# Altium schematic symbol library LQH32MN220J23L.SchLib: 1 symbol
Pins are listed as number, name and electrical type; pins without a type are passive.

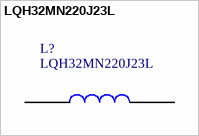
[diagram p0: symbol LQH32MN220J23L]

## LQH32MN220J23L
designator L?
/ Inductor with Inductance: 22uH Tol. +/-5%, Package: 1210 (3225) /; MF: Murata; SnapEDA_Link: https://www.snapeda.com/parts/LQH32MN220J23L/Murata/view-part/4549823/?ref=snap; MP: LQH32MN220J23L; Check_prices: https://www.snapeda.com/parts/LQH32MN220J23L/Murata/view-part/4549823/?ref=eda; Package: NONSTANDARD; DigiKey-Purchase-URL: https://snapeda.com/shop?store=DigiKey&id=4549823; Digi-Key_Part_Number: 490-2506-1-ND; Mouser-Purchase-URL: https://snapeda.com/shop?store=Mouser&id=4549823; Value: *
footprint *IND_LQH32MN220J23L
pins: 1, 2